# Altium schematic symbol library Sensor.SchLib: 12 symbols
Pins are listed as number, name and electrical type; pins without a type are passive.

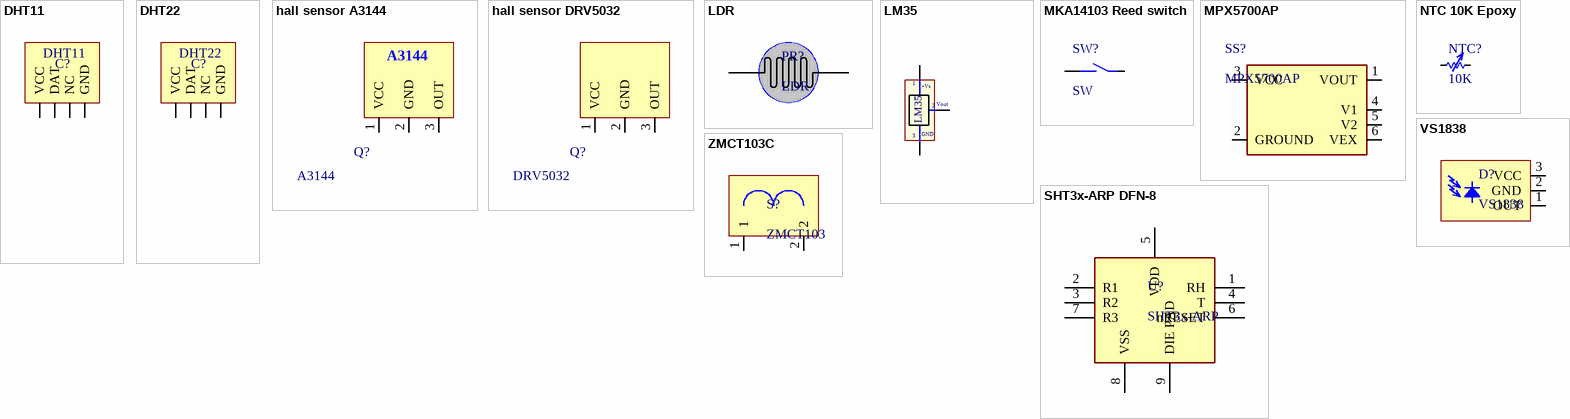
[diagram p0: symbols DHT11 to ZMCT103C]

## DHT11
designator C?
DHT11; Code: 6102-014; ComponentLink1 Description: Manufacturer; ComponentLink2 Description: Datasheet; ComponentLink1URL: http://www.we-online.com; ComponentLink2URL: http://katalog.we-online.de/em/datasheet/6130xx143121.pdf
footprint DHT11
footprint DHT11_H
pins: 1 VCC, 2 DAT, 3 NC, 4 GND

## DHT22
designator C?
DHT22; Code: 6101-016; ComponentLink1 Description: Manufacturer; ComponentLink2 Description: Datasheet; ComponentLink1URL: http://www.we-online.com; ComponentLink2URL: http://katalog.we-online.de/em/datasheet/6130xx143121.pdf
footprint DHT22
footprint DHT22-SMD
pins: 1 VCC, 2 DAT, 3 NC, 4 GND

## hall sensor A3144
designator Q?, comment A3144
Sensitive Hall Effect Switches for High-Temperature Operation 4.5-24V; Code: 6110-015; ComponentLink1Description: Datasheet; ComponentLink1URL: https://www.elecrow.com/download/A3141-2-3-4-Datasheet.pdf
footprint QTO-92 (TO-92)
pins: 1 VCC, 2 GND, 3 OUT

## hall sensor DRV5032
designator Q?, comment DRV5032
Ultra-Low-PowerDigital-SwitchHall EffectSensor; Value: N/A
footprint QTO-92 (TO-92)
pins: 1 VCC, 2 GND, 3 OUT

## LDR
designator PR?
Photoresistor LDR CDS; Code: 1037-001
footprint LDR (LDR cds)
pins: 1, 2

## LM35
designator U?
Temperature Sensor Analog, TO-92; Code: 6101-029
footprint LM35 QTO-92 (TO-92)
pins: 1 +Vs, 2 Vout, 3 -
text: GND

## MKA14103 Reed switch
designator SW?, comment SW
reed switch cong tac tu; Code: 6110-030
footprint reed switch
pins: 1, 2
1 alternate drawing of the same symbol

## MPX5700AP
designator SS?
MPX5700 Series 0 to 700 kPa (0 to 101.5 psi) 15 to 700 kPa (2.18 to 101.5 psi) 0.2 to 4.7 V Output; Designed by: TranLuyen; Code: N/A
footprint MPX5700AP
pins: 1 VOUT, 2 GROUND, 3 VCC, 4 V1, 5 V2, 6 VEX

## NTC 10K Epoxy
designator NTC?, comment 10K
NTC 10K Epoxy, 2 pin; Code: N/A
footprint NTC 10K
pins: 1, 2

## SHT3x-ARP DFN-8
designator U?, comment SHT3x-ARP
Humidity and Temperature Sensor IC  2.4 V to 5.5 V; Designed by: TranLuyen; Code: N/A
footprint SHT31-ARP-B_0-L
footprint SHT31-ARP-B_0
pins: 1 RH, 2 R1, 3 R2, 4 T, 5 VDD, 6 nRESET, 7 R3, 8 VSS, 9 DIE PAD

## VS1838
designator D?
VS1838, TL1838, VS1838B, 38KHz IR; Code: M-6104-006
footprint XX1838X (38KHz IR)
pins: 1 OUT, 2 GND, 3 VCC

## ZMCT103C
designator S?, comment ZMCT103
Current Transformer, 1000:1; Code: N/A
footprint ZMCT103C-RA
footprint ZMCT103C-ST
pins: 1, 2